# Altium schematic symbol library DISP,Graphic,OLED,128x32,X087-2832TSWIG02-H14.Schlib: 1 symbol
Pins are listed as number, name and electrical type; pins without a type are passive.

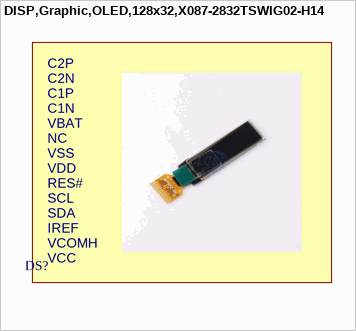
[diagram p0: symbol DISP,Graphic,OLED,128x32,X087-2832TSWIG02-H14]

## DISP,Graphic,OLED,128x32,X087-2832TSWIG02-H14
designator DS?
text: C2P; C2N; C1P; C1N; VBAT; NC; VSS; VDD; RES#; SCL; SDA; IREF; VCOMH; VCC